# Altium footprint library 5708-RC.PcbLib: 1 footprints
Each footprint in its own frame and in the unit in brackets; x right, y up, seen from the top. Pads: shape width x height; smd on the part's side, far side on the other; paste and mask are expansions set on the pad; w line width, h text height; cw(c..) or ccw(c..) is an arc to the next point about the centre after c.
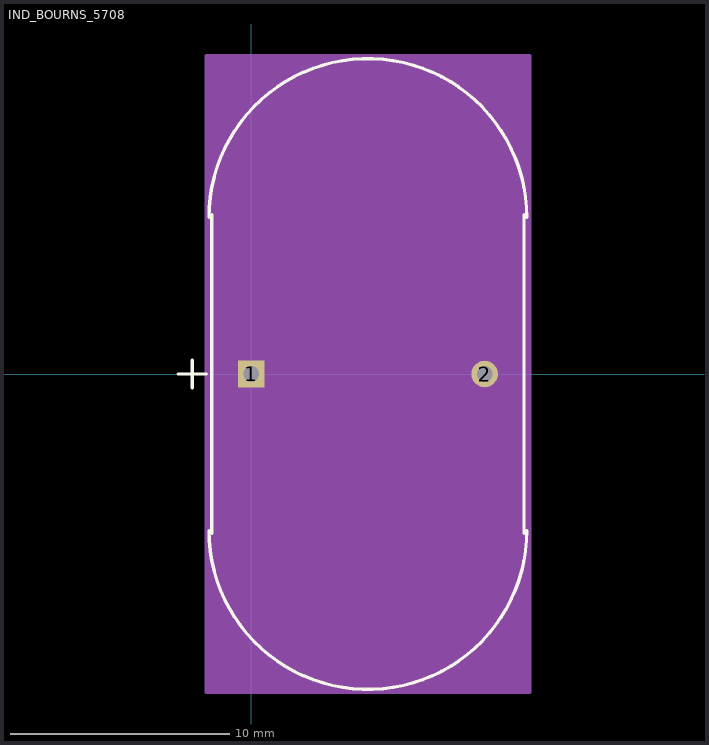
[diagram p0: the footprint, top view; thin cyan lines are the x and y axes]

## IND_BOURNS_5708 [mil]
pads (2):
  rect 48x48 hole 28 paste-24 mask+0: 1(0,0)
  round 48 hole 28 paste-24 mask+0: 2(420,0)
Top Overlay:
  lines w6: -131,0 -81,0 ; -106,-25 -106,25 ; -76,-281.5 ccw(c210,-281.5) 496,-281.5 ; -76,281.5 cw(c210,281.5) 496,281.5 ; -71,-286.5 -71,286.5 ; 491,-286.5 491,286.5
  text ".Designator" at 72.5,-25 h50
Mechanical 13:
  lines w1: -131,0 -81,0 ; -106,-25 -106,25 ; -71,-281.5 -71,281.5 cw(c210,281.5) 491,281.5 491,-281.5 cw(c210,-281.5) -71,-281.5
  text ".Designator" at 72.5,-25 h50
Mechanical 15:
  region: 501,-572.5 -81,-572.5 -81,572.5 501,572.5
  lines w6: -81,-572.5 -81,572.5 501,572.5 501,-572.5 -81,-572.5